# Altium schematic symbol library Interface_ICs.SchLib: 5 symbols
Pins are listed as number, name and electrical type; pins without a type are passive.

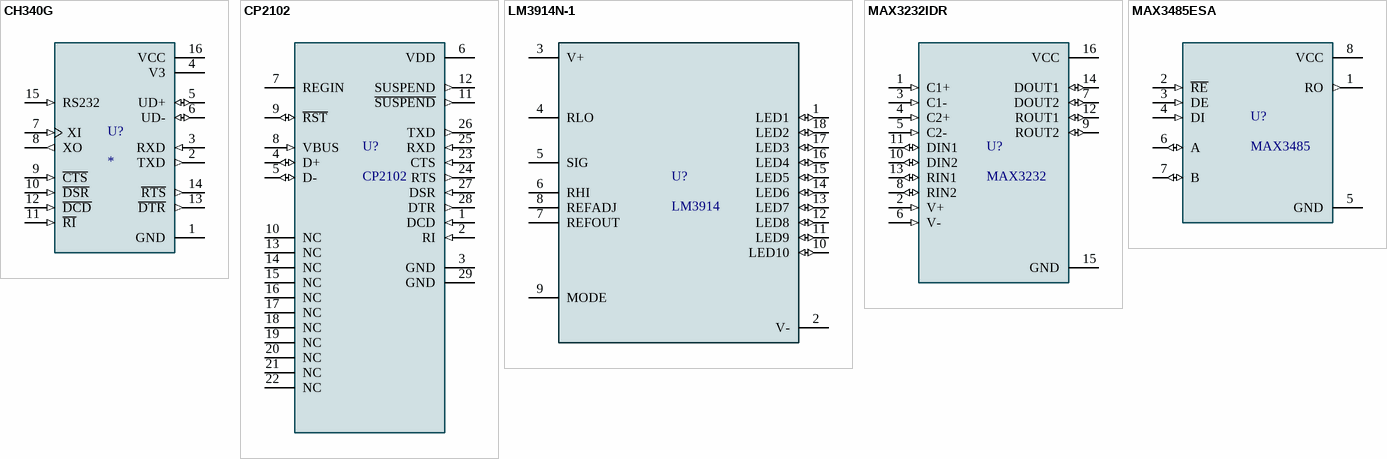
[diagram p0: symbols CH340G to MAX3485ESA]

## CH340G
designator U?
USB Interface Integrated Circuit; MP: Ch340G; MF: WCH; Value: *; SnapEDA_Link: https://www.snapeda.com/parts/Ch340G/WCH/view-part/?ref=snap; Check_prices: https://www.snapeda.com/parts/Ch340G/WCH/view-part/?ref=eda; Availability: Not in stock; Price: None; Package: None
footprint Ch340G (SOIC127P600X180-16N)
pins: 1 GND (power), 2 TXD (out), 3 RXD (in), 4 V3 (power), 5 UD+ (io), 6 UD- (io), 7 XI (in), 8 XO (out), 9 ~{CTS} (in), 10 ~{DSR} (in), 11 ~{RI} (in), 12 ~{DCD} (in), 13 ~{DTR} (out), 14 ~{RTS} (out), 15 RS232 (in), 16 VCC (power)

## CP2102
designator U?
CP2102N USB 2.0 to UART (RS232) Bridge Interface Evaluation Board; MF: Silicon Labs; Purchase-URL: https://pricing.snapeda.com/search/part/CP2102/?ref=eda; Package: WFQFN-20 Silicon Labs; Value: *; Check_prices: https://www.snapeda.com/parts/CP2102/Silicon+Labs/view-part/?ref=eda; SnapEDA_Link: https://www.snapeda.com/parts/CP2102/Silicon+Labs/view-part/?ref=snap; Availability: In Stock; Price: None; MP: CP2102
footprint CP2102 (QFN50P500X500X100-29N)
pins: 1 DCD (in), 2 RI (in), 3 GND (power), 4 D+ (io), 5 D- (io), 6 VDD (power), 7 REGIN (power), 8 VBUS (in), 9 ~{RST} (io), 10 NC, 11 ~{SUSPEND} (out), 12 SUSPEND (out), 13 NC, 14 NC, 15 NC, 16 NC, 17 NC, 18 NC, 19 NC, 20 NC, 21 NC, 22 NC, 23 CTS (in), 24 RTS (out), 25 RXD (in), 26 TXD (out), 27 DSR (in), 28 DTR (out), 29 GND (power)

## LM3914N-1
designator U?, comment LM3914
LED, LCD, Vacuum Fluorescent (VF) Driver 18-PDIP; MF: Texas Instruments; MP: LM3914N-1/NOPB; SnapEDA_Link: https://www.snapeda.com/parts/LM3914N-1/NOPB/Texas+Instruments/view-part/?ref=snap; Package: PDIP-18 Texas Instruments; Value: *; Check_prices: https://www.snapeda.com/parts/LM3914N-1/NOPB/Texas+Instruments/view-part/?ref=eda
footprint LM3914N-1 (DIP952W45P254L2336H533Q18)
pins: 1 LED1 (io), 2 V- (power), 3 V+ (power), 4 RLO (power), 5 SIG (power), 6 RHI (power), 7 REFOUT (power), 8 REFADJ (power), 9 MODE (power), 10 LED10 (io), 11 LED9 (io), 12 LED8 (io), 13 LED7 (io), 14 LED6 (io), 15 LED5 (io), 16 LED4 (io), 17 LED3 (io), 18 LED2 (io)

## MAX3232IDR
designator U?, comment MAX3232
3-V to 5.5-V multichannel RS-232 line driver & receiver 16-SOIC -40 to 85; MP: MAX3232IDR; MF: Texas Instruments; Check_prices: https://www.snapeda.com/parts/MAX3232IDR/Texas%20Instruments/view-part/559735/?ref=eda; Value: *; Package: SOIC-16 Texas Instruments; Purchase-URL: https://pricing.snapeda.com/search/part/MAX3232IDR/?ref=eda; SnapEDA_Link: https://www.snapeda.com/parts/MAX3232IDR/Texas%20Instruments/view-part/559735/?ref=snap; Digi-Key_Part_Number: 296-13098-1-ND
footprint MAX3232 (SOIC127P600X175-16N)
pins: 1 C1+ (in), 2 V+ (in), 3 C1- (in), 4 C2+ (in), 5 C2- (in), 6 V- (in), 7 DOUT2 (io), 8 RIN2 (io), 9 ROUT2 (io), 10 DIN2 (io), 11 DIN1 (io), 12 ROUT1 (io), 13 RIN1 (io), 14 DOUT1 (io), 15 GND (power), 16 VCC (power)

## MAX3485ESA
designator U?, comment MAX3485
1/1 Transceiver Half RS422, RS485 8-SOIC; MF: Maxim Integrated; MP: MAX3485ESA+; Package: SOIC-8 Maxim; Price: None; SnapEDA_Link: https://www.snapeda.com/parts/MAX3485ESA%2B/Maxim%20Integrated/view-part/225576/?ref=snap; Availability: Unavailable; Value: *
footprint MAX3485 (SOIC127P600X175-8N)
pins: 1 RO (out), 2 ~{RE} (in), 3 DE (in), 4 DI (in), 5 GND (power), 6 A (io), 7 B (io), 8 VCC (power)